# Altium schematic symbol library Generic.SchLib: 11 symbols
Pins are listed as number, name and electrical type; pins without a type are passive.

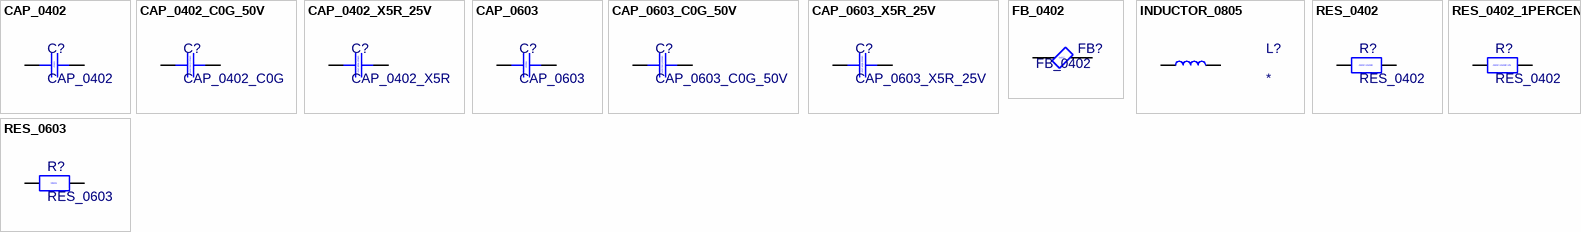
[diagram p0: symbols CAP_0402 to RES_0603]

## CAP_0402
designator C?
Capacitor 0402 generic
footprint CAP_0402 (generic 0402 cap footprint)
pins: 1, 2
text: 0402

## CAP_0402_C0G_50V
designator C?, comment CAP_0402_C0G
Capacitor 0402 generic, C0G (NP0), 50V
footprint CAP_0402 (generic 0402 cap footprint)
pins: 1, 2
text: 0402 C0G 50V

## CAP_0402_X5R_25V
designator C?, comment CAP_0402_X5R
Capacitor 0402 generic, X5R, 25V
footprint CAP_0402 (generic 0402 cap footprint)
pins: 1, 2
text: 0402 X5R 25V

## CAP_0603
designator C?
Capacitor 0603 generic
footprint CAP_0603_L (generic, 0.5mm longer (max pad-to-pad) for better hand-solderability)
pins: 1, 2
text: 0603

## CAP_0603_C0G_50V
designator C?
Capacitor 0603 generic, C0G (NP0), 50V
footprint CAP_0603_L (generic, 0.5mm longer (max pad-to-pad) for better hand-solderability)
pins: 1, 2
text: 0603 C0G 50V

## CAP_0603_X5R_25V
designator C?
Capacitor 0603 generic, X5R, 25V
footprint CAP_0603_L (generic, 0.5mm longer (max pad-to-pad) for better hand-solderability)
pins: 1, 2
text: 0603 X5R 25V

## FB_0402
designator FB?
Ferrite bead 0402 generic
footprint FB_0402 (Chip Inductor, 2-Leads, Body 1,00x0,50mm, IPC Medium Density)
pins: 1, 2
text: 0402

## INDUCTOR_0805
designator L?
Inductor (L) 0805 generic
footprint INDUCTOR_0805 (Generic inductor (L) 0805)
pins: 1, 2

## RES_0402
designator R?
Resistor 0402 generic, 1/16W
footprint RES_0402 (0402 Chip Resistor, 2-Leads, Body 1,00x0,5mm, IPC Medium Density)
pins: 1, 2
text: 0402 1/16W

## RES_0402_1PERCENT
designator R?, comment RES_0402
Resistor 0402 generic, 1/16W, 1%
footprint RES_0402 (0402 Chip Resistor, 2-Leads, Body 1,00x0,5mm, IPC Medium Density)
pins: 1, 2
text: 0402 1/16W 1%

## RES_0603
designator R?
Resistor 0603 generic
footprint RES_0603 ((0603 with bigger pads for hand-soldering) Chip Resistor, 2-Leads, Body 1,85x1,05mm, IPC Medium Density)
pins: 1, 2
text: 0603